# Altium footprint library Switch-TactileButton.PcbLib: 78 footprints (part 1 of 5)
Each footprint in its own frame and in the unit in brackets; x right, y up, seen from the top. Pads: shape width x height; smd on the part's side, far side on the other; paste and mask are expansions set on the pad; w line width, h text height; cw(c..) or ccw(c..) is an arc to the next point about the centre after c.
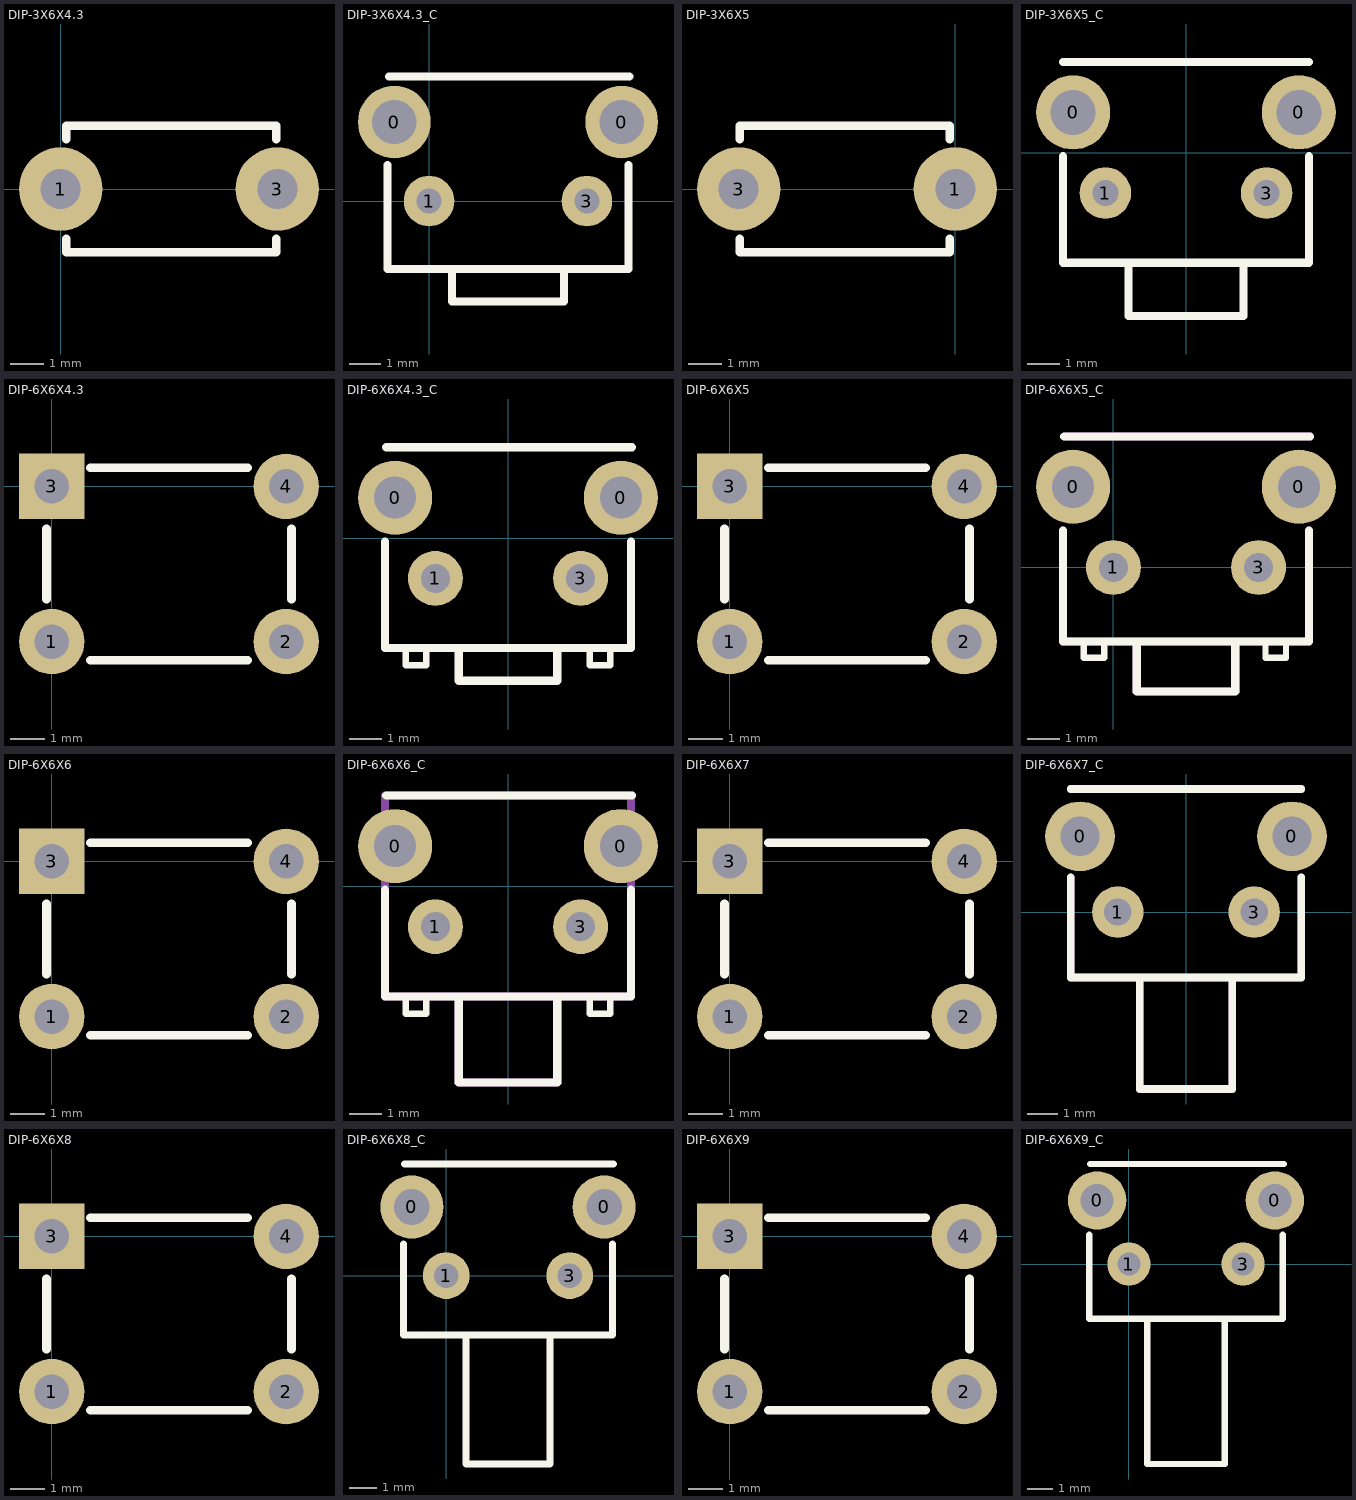
[diagram p0: the footprints below, top view; thin cyan lines are the x and y axes]

## DIP-3X6X4.3 [mm]
pads (2):
  round 2.5 hole 1.2: 1(0,0) 3(6.5,0)
Top Overlay:
  lines w0.254: 0.162,-1.499 0.162,-1.9 6.462,-1.9 6.462,-1.499 ; 0.162,1.499 0.162,1.9 6.462,1.9 6.462,1.499
3D body "DIP-3X6X4.3.STEP": height 4.31, standoff -3.49, extent -0.635,-1.75 7.194,1.75

## DIP-3X6X4.3_C [mm]
pads (4):
  round 2.3 hole 1.4: 0(-1.1,2.5) 0(6.1,2.5)
  round 1.6 hole 0.8: 1(0,0) 3(5,0)
Top Overlay:
  lines w0.254: -1.31,1.143 -1.31,-2.159 6.31,-2.159 6.31,1.143 ; -1.27,3.937 6.35,3.937 ; 0.722,-2.159 0.722,-3.175 4.278,-3.175 4.278,-2.159
Top Value:
  text "'.Comment'" at -2.028,0.816 h2
Top Designator:
  text "'.Designator'" at -3.308,0.978 h2
3D body "DIP-3X6X4.3_V.STEP": height 4.45, standoff -2.8, extent -1.456,-3.048 6.536,3.502

## DIP-3X6X5 [mm]
pads (2):
  round 2.5 hole 1.2: 1(0,0) 3(-6.5,0)
Top Overlay:
  lines w0.254: -6.462,-1.499 -6.462,-1.9 -0.162,-1.9 -0.162,-1.499 ; -6.462,1.499 -6.462,1.9 -0.162,1.9 -0.162,1.499
3D body "DIP-3X6X5.STEP": height 5.01, standoff -3.49, extent -7.291,-1.722 0.537,1.778

## DIP-3X6X5_C [mm] "SHOU HAN(首韩) - TS365ZJ - C557598"
pads (4):
  round 2.3 hole 1.4: 0(-3.5,1.25) 0(3.5,1.25)
  round 1.6 hole 0.8: 1(-2.5,-1.25) 3(2.5,-1.25)
Top Overlay:
  lines w0.254: -3.81,-0.107 -3.81,-3.409 3.81,-3.409 3.81,-0.107 ; -3.81,2.814 3.81,2.814 ; -1.778,-3.409 -1.778,-5.06 1.778,-5.06 1.778,-3.409
Top Value:
  text "'.Comment'" at -4.401,-0.815 h2
Top Designator:
  text "'.Designator'" at -5.681,-0.653 h2
3D body "DIP-3X6X5_V.STEP": height 4.55, standoff -2.7, extent -3.937,-5.002 4.056,2.248

## DIP-6X6X4.3 [mm]
pads (4):
  round 1.9 hole 1: 1(0,-4.5) 2(6.8,-4.5) 4(6.8,0)
  rect 1.9x1.9 hole 1: 3(0,0)
Top Overlay:
  lines w0.254: -0.156,-3.266 -0.156,-1.234 ; 1.114,-5.044 5.686,-5.044 ; 1.114,0.544 5.686,0.544 ; 6.956,-3.266 6.956,-1.234
3D body "DIP-6X6X4.3.STEP": height 4.25, standoff -3.45, extent -0.664,-5.25 7.548,0.75

## DIP-6X6X4.3_C [mm]
pads (4):
  round 2.3 hole 1.3: 0(-3.5,1.25) 0(3.5,1.25)
  round 1.7 hole 0.9: 1(-2.25,-1.25) 3(2.25,-1.25)
Top Overlay:
  lines w0.2: -3.169,-3.409 -3.169,-3.95 -2.534,-3.95 -2.534,-3.409 ; 2.534,-3.409 2.534,-3.95 3.169,-3.95 3.169,-3.409
  lines w0.254: -3.81,-0.107 -3.81,-3.409 3.81,-3.409 3.81,-0.107 ; -3.774,2.814 3.846,2.814 ; -1.524,-3.409 -1.524,-4.425 1.524,-4.425 1.524,-3.409
Top Value:
  text "'.Comment'" at -4.405,-0.18 h2
Top Designator:
  text "'.Designator'" at -5.685,-0.018 h2
3D body "DIP-6X6X4.3_V.STEP": height 7.67, standoff -3.2, extent -4.184,-4.298 4.184,2.852

## DIP-6X6X5 [mm]
pads (4):
  round 1.9 hole 1: 1(0,-4.5) 2(6.8,-4.5) 4(6.8,0)
  rect 1.9x1.9 hole 1: 3(0,0)
Top Overlay:
  lines w0.254: -0.156,-3.266 -0.156,-1.234 ; 1.114,-5.044 5.686,-5.044 ; 1.114,0.544 5.686,0.544 ; 6.956,-3.266 6.956,-1.234
3D body "DIP-6X6X5.STEP": height 4.95, standoff -3.45, extent -0.804,-5.238 7.408,0.762

## DIP-6X6X5_C [mm] "HCTL(华灿天禄) - TC-6615-5-260G - C2845270"
pads (4):
  round 2.3 hole 1.3: 0(-1.25,2.5) 0(5.75,2.5)
  round 1.7 hole 0.9: 1(0,0) 3(4.5,0)
Top Overlay:
  lines w0.2: -0.919,-2.3 -0.919,-2.8 -0.284,-2.8 -0.284,-2.3 ; 4.715,-2.3 4.715,-2.8 5.35,-2.8 5.35,-2.3
  lines w0.254: -1.56,1.143 -1.56,-2.3 6.06,-2.3 6.06,1.143 ; -1.524,4.064 6.096,4.064 ; 0.726,-2.3 0.726,-3.85 3.774,-3.85 3.774,-2.3
Top Value:
  text "'.Comment'" at -2.155,0.816 h2
Top Designator:
  text "'.Designator'" at -3.435,0.978 h2
Top Assembly (Mech20):
  lines w0.254: -1.56,1.143 -1.56,-2.3 6.06,-2.3 6.06,1.143 ; -1.524,4.064 6.096,4.064 ; 0.726,-2.3 0.726,-3.85 3.774,-3.85 3.774,-2.3
3D body "TC-6615-5-260G.step": height 7.2, standoff -3.7, extent -1.891,-3.937 6.463,3.913

## DIP-6X6X6 [mm]
pads (4):
  round 1.9 hole 1: 1(0,-4.5) 2(6.8,-4.5) 4(6.8,0)
  rect 1.9x1.9 hole 1: 3(0,0)
Top Overlay:
  lines w0.254: -0.156,-3.266 -0.156,-1.234 ; 1.114,-5.044 5.686,-5.044 ; 1.114,0.544 5.686,0.544 ; 6.956,-3.266 6.956,-1.234
3D body "DIP-6X6X6.STEP": height 5.95, standoff -3.45, extent -0.677,-5.238 7.535,0.762

## DIP-6X6X6_C [mm] "HCTL(华灿天禄) - TC-6615-6-260G - C2845272"
pads (4):
  round 2.3 hole 1.3: 0(-3.5,1.25) 0(3.5,1.25)
  round 1.7 hole 0.9: 1(-2.25,-1.25) 3(2.25,-1.25)
Top Overlay:
  lines w0.2: -3.169,-3.409 -3.169,-3.95 -2.534,-3.95 -2.534,-3.409 ; 2.534,-3.409 2.534,-3.95 3.169,-3.95 3.169,-3.409
  lines w0.254: -3.81,-0.107 -3.81,-3.409 3.81,-3.409 3.81,-0.107 ; -3.774,2.814 3.846,2.814 ; -1.524,-3.409 -1.524,-6.076 1.524,-6.076 1.524,-3.409
Top Value:
  text "'.Comment'" at -4.409,-0.854 h2
Top Designator:
  text "'.Designator'" at -5.715,-0.667 h2
Top Assembly (Mech20):
  lines w0.254: -3.81,2.814 -3.81,-3.409 3.81,-3.409 3.81,2.814 ; -3.774,2.814 3.846,2.814 ; -1.524,-3.409 -1.524,-6.076 1.524,-6.076 1.524,-3.409
3D body "TC-6615-6-260G.step": height 7.1, standoff -3.8, extent -4.298,-6.096 4.298,2.704

## DIP-6X6X7 [mm]
pads (4):
  round 1.9 hole 1: 1(0,-4.5) 2(6.8,-4.5) 4(6.8,0)
  rect 1.9x1.9 hole 1: 3(0,0)
Top Overlay:
  lines w0.254: -0.156,-3.266 -0.156,-1.234 ; 1.114,-5.044 5.686,-5.044 ; 1.114,0.544 5.686,0.544 ; 6.956,-3.266 6.956,-1.234
3D body "DIP-6X6X7.STEP": height 6.95, standoff -3.45, extent -0.677,-5.207 7.535,0.793

## DIP-6X6X7_C [mm] "HCTL(华灿天禄) TC-6615-7-260G ,C2845275"
pads (4):
  round 2.3 hole 1.3: 0(-3.5,2.5) 0(3.5,2.5)
  round 1.7 hole 0.9: 1(-2.25,0) 3(2.25,0)
Top Overlay:
  lines w0.254: -3.81,1.143 -3.81,-2.159 3.81,-2.159 3.81,1.143 ; -3.81,4.064 3.81,4.064 ; -1.524,-2.159 -1.524,-5.842 1.524,-5.842 1.524,-2.159
Top Value:
  text "'.Comment'" at -4.441,0.816 h2
Top Designator:
  text "'.Designator'" at -5.721,0.978 h2
Top Assembly (Mech20):
  lines w0.254: -3.81,1.143 -3.81,-2.159 3.81,-2.159 3.81,1.143 ; -3.81,4.064 3.81,4.064 ; -1.524,-2.159 -1.524,-5.842 1.524,-5.842 1.524,-2.159
3D body "DIP-6X6X7_V.STEP": height 7.47, standoff -3.4, extent -4.154,-5.747 4.209,4.103

## DIP-6X6X8 [mm]
pads (4):
  round 1.9 hole 1: 1(0,-4.5) 2(6.8,-4.5) 4(6.8,0)
  rect 1.9x1.9 hole 1: 3(0,0)
Top Overlay:
  lines w0.254: -0.156,-3.266 -0.156,-1.234 ; 1.114,-5.044 5.686,-5.044 ; 1.114,0.544 5.686,0.544 ; 6.956,-3.266 6.956,-1.234
3D body "DIP-6X6X8.STEP": height 7.95, standoff -3.45, extent -0.55,-5.238 7.662,0.762

## DIP-6X6X8_C [mm] "HCTL(华灿天禄) - TC-6615-8-260G - C2845277"
pads (4):
  round 2.3 hole 1.3: 0(-1.25,2.5) 0(5.75,2.5)
  round 1.7 hole 0.9: 1(0,0) 3(4.5,0)
Top Overlay:
  lines w0.254: -1.56,1.143 -1.56,-2.159 6.06,-2.159 6.06,1.143 ; -1.524,4.064 6.096,4.064 ; 0.726,-2.159 0.726,-6.858 3.774,-6.858 3.774,-2.159
Top Value:
  text "'.Comment'" at -2.409,0.689 h2
Top Designator:
  text "'.Designator'" at -3.689,0.851 h2
3D body "DIP-6X6X8_V.STEP": height 7.47, standoff -3.4, extent -1.934,-6.659 6.434,4.191

## DIP-6X6X9 [mm]
pads (4):
  round 1.9 hole 1: 1(0,-4.5) 2(6.8,-4.5) 4(6.8,0)
  rect 1.9x1.9 hole 1: 3(0,0)
Top Overlay:
  lines w0.254: -0.156,-3.266 -0.156,-1.234 ; 1.114,-5.044 5.686,-5.044 ; 1.114,0.544 5.686,0.544 ; 6.956,-3.266 6.956,-1.234
3D body "DIP-6X6X9.STEP": height 8.95, standoff -3.45, extent -0.677,-5.207 7.535,0.793

## DIP-6X6X9_C [mm]
pads (4):
  round 2.3 hole 1.3: 0(-1.25,2.5) 0(5.75,2.5)
  round 1.7 hole 0.9: 1(0,0) 3(4.5,0)
Top Overlay:
  lines w0.254: -1.56,1.143 -1.56,-2.159 6.06,-2.159 6.06,1.143 ; -1.524,3.937 6.096,3.937 ; 0.726,-2.159 0.726,-7.874 3.774,-7.874 3.774,-2.159
3D body "DIP-6X6X9_V.STEP": height 7.47, standoff -3.4, extent -1.898,-7.913 6.47,3.937